# Altium footprint library WR-WTB_2.00mm.PcbLib: 70 footprints (part 5 of 5)
Each footprint in its own frame and in the unit in brackets; x right, y up, seen from the top. Pads: shape width x height; smd on the part's side, far side on the other; paste and mask are expansions set on the pad; w line width, h text height; cw(c..) or ccw(c..) is an arc to the next point about the centre after c.
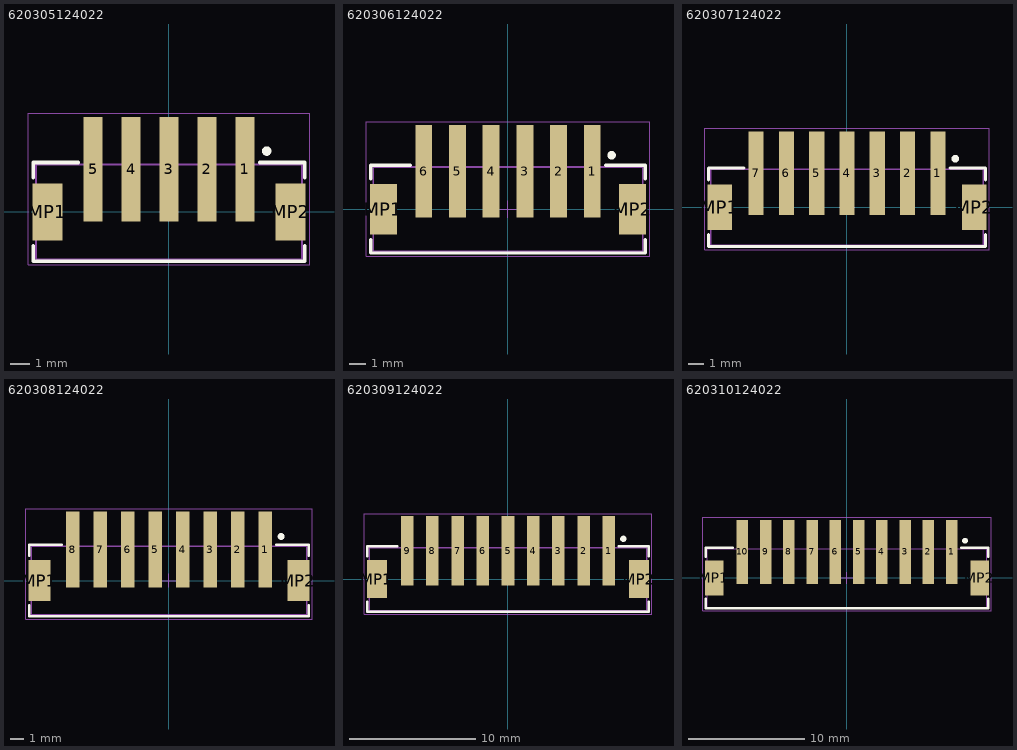
[diagram p4: the footprints below, top view; thin cyan lines are the x and y axes]

## 620305124022 [mm] "2.00mm SMT Male Vertical Shrouded Header, 5p"
height 6.86
pads (7):
  rect 1x5.5 smd: 1(4,2.25) 2(2,2.25) 3(0,2.25) 4(-2,2.25) 5(-4,2.25)
  rect 1.6x3 smd: MP1(-6.4,0) MP2(6.4,0)
Top Overlay:
  circle w0.25: c5.15,3.2 r0.125
  lines w0.2: -7.15,-1.8 -7.15,-2.6 7.15,-2.6 7.15,-1.8 ; -7.15,1.8 -7.15,2.6 -4.8,2.6 ; 4.8,2.6 7.15,2.6 7.15,1.8
Mechanical 13:
  lines w0.1: -7,-2.5 -7,2.5 7,2.5 7,-2.5 -7,-2.5
Mechanical 15:
  lines w0.05: -0.5,0 0.5,0 ; 0,-0.5 0,0.5 ; -7.4,-2.8 7.4,-2.8 7.4,5.2 -7.4,5.2 -7.4,-2.8
3D body "620305124022.stp": height 6.77, standoff -0.01, extent -7,-2.5 7,4.51

## 620306124022 [mm] "2.00mm SMT Male Vertical Shrouded Header, 6p"
height 6.86
pads (8):
  rect 1x5.5 smd: 1(5,2.25) 2(3,2.25) 3(1,2.25) 4(-1,2.25) 5(-3,2.25) 6(-5,2.25)
  rect 1.6x3 smd: MP1(-7.4,0) MP2(7.4,0)
Top Overlay:
  circle w0.25: c6.15,3.2 r0.125
  lines w0.2: -8.15,-1.8 -8.15,-2.6 8.15,-2.6 8.15,-1.8 ; -8.15,1.8 -8.15,2.6 -5.8,2.6 ; 5.8,2.6 8.15,2.6 8.15,1.8
Mechanical 13:
  lines w0.1: -8,-2.5 -8,2.5 8,2.5 8,-2.5 -8,-2.5
Mechanical 15:
  lines w0.05: -0.5,0 0.5,0 ; 0,-0.5 0,0.5 ; -8.4,-2.8 8.4,-2.8 8.4,5.2 -8.4,5.2 -8.4,-2.8
3D body "620306124022.stp": height 6.77, standoff -0.01, extent -8,-2.5 8,4.51

## 620307124022 [mm] "2.00mm SMT Male Vertical Shrouded Header, 7p"
height 6.86
pads (9):
  rect 1x5.5 smd: 1(6,2.25) 2(4,2.25) 3(2,2.25) 4(0,2.25) 5(-2,2.25) 6(-4,2.25) 7(-6,2.25)
  rect 1.6x3 smd: MP1(-8.4,0) MP2(8.4,0)
Top Overlay:
  circle w0.25: c7.15,3.2 r0.125
  lines w0.2: -9.15,-1.8 -9.15,-2.6 9.15,-2.6 9.15,-1.8 ; -9.15,1.8 -9.15,2.6 -6.8,2.6 ; 6.8,2.6 9.15,2.6 9.15,1.8
Mechanical 13:
  lines w0.1: -9,-2.5 9,-2.5 9,2.5 -9,2.5 -9,-2.5
Mechanical 15:
  lines w0.05: -0.5,0 0.5,0 ; 0,-0.5 0,0.5 ; -9.4,-2.8 -9.4,5.2 9.4,5.2 9.4,-2.8 -9.4,-2.8
3D body "620307124022.stp": height 6.77, standoff -0.01, extent -9,-2.5 9,4.51

## 620308124022 [mm] "2.00mm SMT Male Vertical Shrouded Header, 8p"
height 6.86
pads (10):
  rect 1x5.5 smd: 1(7,2.25) 2(5,2.25) 3(3,2.25) 4(1,2.25) 5(-1,2.25) 6(-3,2.25) 7(-5,2.25) 8(-7,2.25)
  rect 1.6x3 smd: MP1(-9.4,0) MP2(9.4,0)
Top Overlay:
  circle w0.25: c8.15,3.2 r0.125
  lines w0.2: -10.15,-1.8 -10.15,-2.6 10.15,-2.6 10.15,-1.8 ; -10.15,1.8 -10.15,2.6 -7.8,2.6 ; 7.8,2.6 10.15,2.6 10.15,1.8
Mechanical 13:
  lines w0.1: -10,-2.5 -10,2.5 10,2.5 10,-2.5 -10,-2.5
Mechanical 15:
  lines w0.05: -0.5,0 0.5,0 ; 0,-0.5 0,0.5 ; -10.4,-2.8 10.4,-2.8 10.4,5.2 -10.4,5.2 -10.4,-2.8
3D body "620308124022.stp": height 6.77, standoff -0.01, extent -10,-2.5 10,4.51

## 620309124022 [mm] "2.00mm SMT Male Vertical Shrouded Header, 9p"
height 6.86
pads (11):
  rect 1x5.5 smd: 1(8,2.25) 2(6,2.25) 3(4,2.25) 4(2,2.25) 5(0,2.25) 6(-2,2.25) 7(-4,2.25) 8(-6,2.25) 9(-8,2.25)
  rect 1.6x3 smd: MP1(-10.4,0) MP2(10.4,0)
Top Overlay:
  circle w0.25: c9.15,3.2 r0.125
  lines w0.2: -11.15,-1.8 -11.15,-2.6 11.15,-2.6 11.15,-1.8 ; -11.15,1.8 -11.15,2.6 -8.8,2.6 ; 8.8,2.6 11.15,2.6 11.15,1.8
Mechanical 13:
  lines w0.1: 11,-2.5 11,2.5 -11,2.5 -11,-2.5 11,-2.5
Mechanical 15:
  lines w0.05: -0.5,0 0.5,0 ; 0,-0.5 0,0.5 ; -11.4,-2.8 -11.4,5.2 11.4,5.2 11.4,-2.8 -11.4,-2.8
3D body "620309124022.stp": height 6.77, standoff -0.01, extent -11,-2.5 11,4.51

## 620310124022 [mm] "2.00mm SMT Male Vertical Shrouded Header, 10p"
height 6.86
pads (12):
  rect 1x5.5 smd: 1(9,2.25) 2(7,2.25) 3(5,2.25) 4(3,2.25) 5(1,2.25) 6(-1,2.25) 7(-3,2.25) 8(-5,2.25) 9(-7,2.25) 10(-9,2.25)
  rect 1.6x3 smd: MP1(-11.4,0) MP2(11.4,0)
Top Overlay:
  circle w0.25: c10.15,3.2 r0.125
  lines w0.2: -12.15,-1.8 -12.15,-2.6 12.15,-2.6 12.15,-1.8 ; -12.15,1.8 -12.15,2.6 -9.8,2.6 ; 9.8,2.6 12.15,2.6 12.15,1.8
Mechanical 13:
  lines w0.1: -12,-2.5 12,-2.5 12,2.5 -12,2.5 -12,-2.5
Mechanical 15:
  lines w0.05: -0.5,0 0.5,0 ; 0,-0.5 0,0.5 ; -12.4,-2.8 -12.4,5.2 12.4,5.2 12.4,-2.8 -12.4,-2.8
3D body "620310124022.stp": height 6.77, standoff -0.01, extent -12,-2.5 12,4.51